# Altium footprint library SamacSys.PcbLib: 5 footprints
Each footprint in its own frame and in the unit in brackets; x right, y up, seen from the top. Pads: shape width x height; smd on the part's side, far side on the other; paste and mask are expansions set on the pad; w line width, h text height; cw(c..) or ccw(c..) is an arc to the next point about the centre after c.
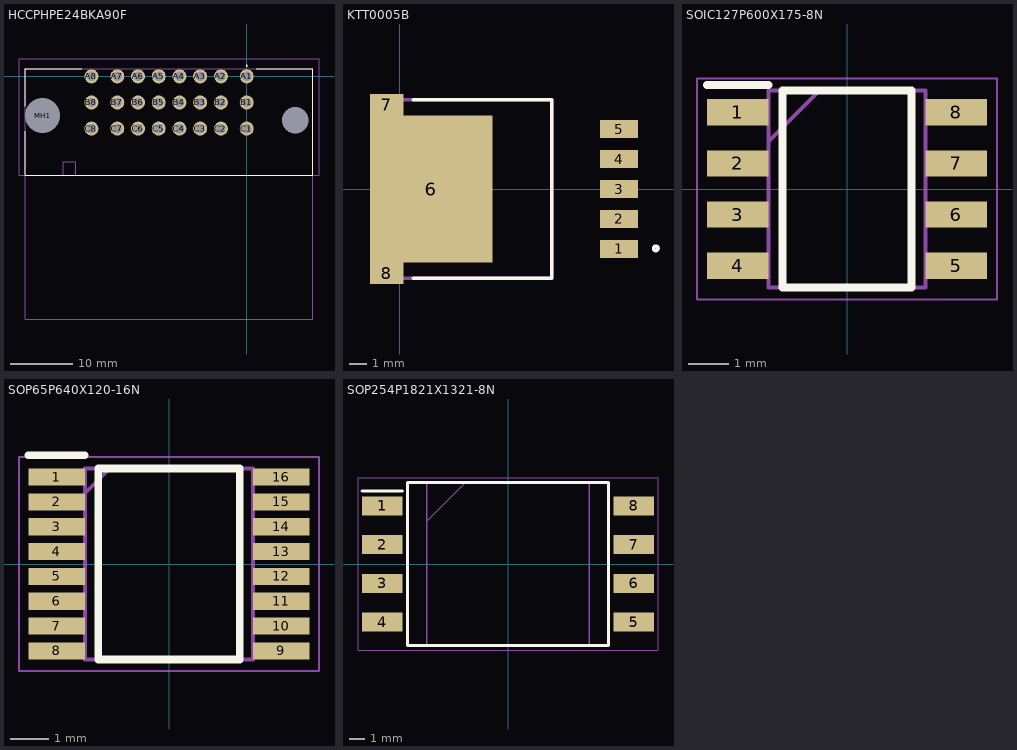
[diagram p0: the footprints below, top view; thin cyan lines are the x and y axes]

## HCCPHPE24BKA90F [mm]
pads (26):
  round 2.25 hole 1.5: A1(0,0) A2(-4.15,0) A3(-7.48,0) A4(-10.81,0) A5(-14.14,0) A6(-17.47,0) A7(-20.8,0) A8(-24.95,0) B1(0,-4.2) B2(-4.15,-4.2) B3(-7.48,-4.2) B4(-10.81,-4.2) B5(-14.14,-4.2) B6(-17.47,-4.2) B7(-20.8,-4.2) B8(-24.95,-4.2) C1(0,-8.4) C2(-4.15,-8.4) C3(-7.48,-8.4) C4(-10.81,-8.4) C5(-14.14,-8.4) C6(-17.47,-8.4) C7(-20.8,-8.4) C8(-24.95,-8.4)
  round 2.8 hole 5.6 unplated: MH1(-32.79,-6.3)
  round 2.136 hole 4.272 unplated: MH2(7.81,-7.05)
Top Overlay:
  lines w0.1: -35.59,-8.8 -35.59,-15.9 10.61,-15.9 10.61,1.2 1.51,1.2 ; -35.59,-4.8 -35.59,1.2 -26.49,1.2
  lines w0.2: -0.09,1.7 ccw(c0.01,1.7) 0.11,1.7 ccw(c0.01,1.7) -0.09,1.7
Mechanical 13:
  lines w0.2: -35.59,-39 10.61,-39 10.61,1.2 -35.59,1.2 -35.59,-39
Mechanical 15:
  lines w0.1: -36.59,-15.9 11.61,-15.9 ; -36.59,-15.9 -36.59,2.8 ; -36.59,-15.9 -36.59,2.8 ; -36.59,-15.9 -29.49,-15.9 -29.49,-13.7 -27.49,-13.7 -27.49,-15.9 11.61,-15.9 ; -36.59,2.8 11.61,2.8 ; -36.59,2.8 11.61,2.8 ; 11.61,-15.9 11.61,2.8 ; 11.61,-15.9 11.61,2.8
3D body "HCCPHPE24BKA90F.stp": height 26.18, standoff -2.77, extent -36.33,-38.69 9.87,1.51

## KTT0005B [mm]
pads (8):
  rect 2.16x1.02 smd: 1(12.461,-3.4) 2(12.461,-1.7) 3(12.461,0) 4(12.461,1.7) 5(12.461,3.4)
  rect 6.99x8.33 smd: 6(1.786,0)
  rect 1.91x1.235 smd: 7(-0.754,4.782) 8(-0.754,-4.782)
Top Overlay:
  circle w0.2: c14.551,-3.375 r0.126
  lines w0.2: 0.756,-5.08 8.64,-5.08 8.64,5.08 0.756,5.08
Mechanical 13:
  lines w0.2: 0,-5.08 0,5.08 8.64,5.08 8.64,-5.08 0,-5.08
3D body "LM2596S-5.0_NOPB.stp": height 4.72, standoff 0, extent -1.11,-5.08 13.24,5.08

## SOIC127P600X175-8N [mm]
pads (8):
  rect 1.525x0.65 smd: 1(-2.712,1.905) 2(-2.712,0.635) 3(-2.712,-0.635) 4(-2.712,-1.905) 5(2.712,-1.905) 6(2.712,-0.635) 7(2.712,0.635) 8(2.712,1.905)
Top Overlay:
  lines w0.2: -3.475,2.58 -1.95,2.58 ; -1.6,-2.45 1.6,-2.45 1.6,2.45 -1.6,2.45 -1.6,-2.45
Mechanical 13:
  lines w0.1: -1.95,1.18 -0.68,2.45 ; -1.95,-2.45 1.95,-2.45 1.95,2.45 -1.95,2.45 -1.95,-2.45
Mechanical 15:
  lines w0.05: -3.725,-2.75 3.725,-2.75 3.725,2.75 -3.725,2.75 -3.725,-2.75
3D body "NE555DR.stp": height 1.75, standoff 0, extent -3,-2.45 3,2.45

## SOP65P640X120-16N [mm]
pads (16):
  rect 1.475x0.45 smd: 1(-2.938,2.275) 2(-2.938,1.625) 3(-2.938,0.975) 4(-2.938,0.325) 5(-2.938,-0.325) 6(-2.938,-0.975) 7(-2.938,-1.625) 8(-2.938,-2.275) 9(2.938,-2.275) 10(2.938,-1.625) 11(2.938,-0.975) 12(2.938,-0.325) 13(2.938,0.325) 14(2.938,0.975) 15(2.938,1.625) 16(2.938,2.275)
Top Overlay:
  lines w0.2: -3.675,2.85 -2.2,2.85 ; -1.85,-2.5 -1.85,2.5 1.85,2.5 1.85,-2.5 -1.85,-2.5
Mechanical 13:
  lines w0.1: -2.2,1.85 -1.55,2.5 ; -2.2,-2.5 -2.2,2.5 2.2,2.5 2.2,-2.5 -2.2,-2.5
Mechanical 15:
  lines w0.05: -3.925,-2.8 -3.925,2.8 3.925,2.8 3.925,-2.8 -3.925,-2.8
3D body "ADG729BRUZ.stp": height 1.2, standoff 0, extent -3.2,-2.5 3.2,2.5

## SOP254P1821X1321-8N [mm]
pads (8):
  rect 2.65x1.25 smd: 1(-8.25,3.81) 2(-8.25,1.27) 3(-8.25,-1.27) 4(-8.25,-3.81) 5(8.25,-3.81) 6(8.25,-1.27) 7(8.25,1.27) 8(8.25,3.81)
Top Overlay:
  lines w0.2: -9.575,4.785 -6.925,4.785 ; -6.575,-5.332 -6.575,5.332 6.575,5.332 6.575,-5.332 -6.575,-5.332
Mechanical 13:
  lines w0.1: -5.332,2.792 -2.792,5.332 ; -5.332,-5.332 -5.332,5.332 5.332,5.332 5.332,-5.332 -5.332,-5.332
Mechanical 15:
  lines w0.05: -9.825,-5.645 -9.825,5.645 9.825,5.645 9.825,-5.645 -9.825,-5.645
3D body "MPXA4250AC6U.stp": height 13.21, standoff 0, extent -9.105,-5.332 9.105,5.332